# Altium footprint library Chris_R.PcbLib: 69 footprints (part 4 of 5)
Each footprint in its own frame and in the unit in brackets; x right, y up, seen from the top. Pads: shape width x height; smd on the part's side, far side on the other; paste and mask are expansions set on the pad; w line width, h text height; cw(c..) or ccw(c..) is an arc to the next point about the centre after c.
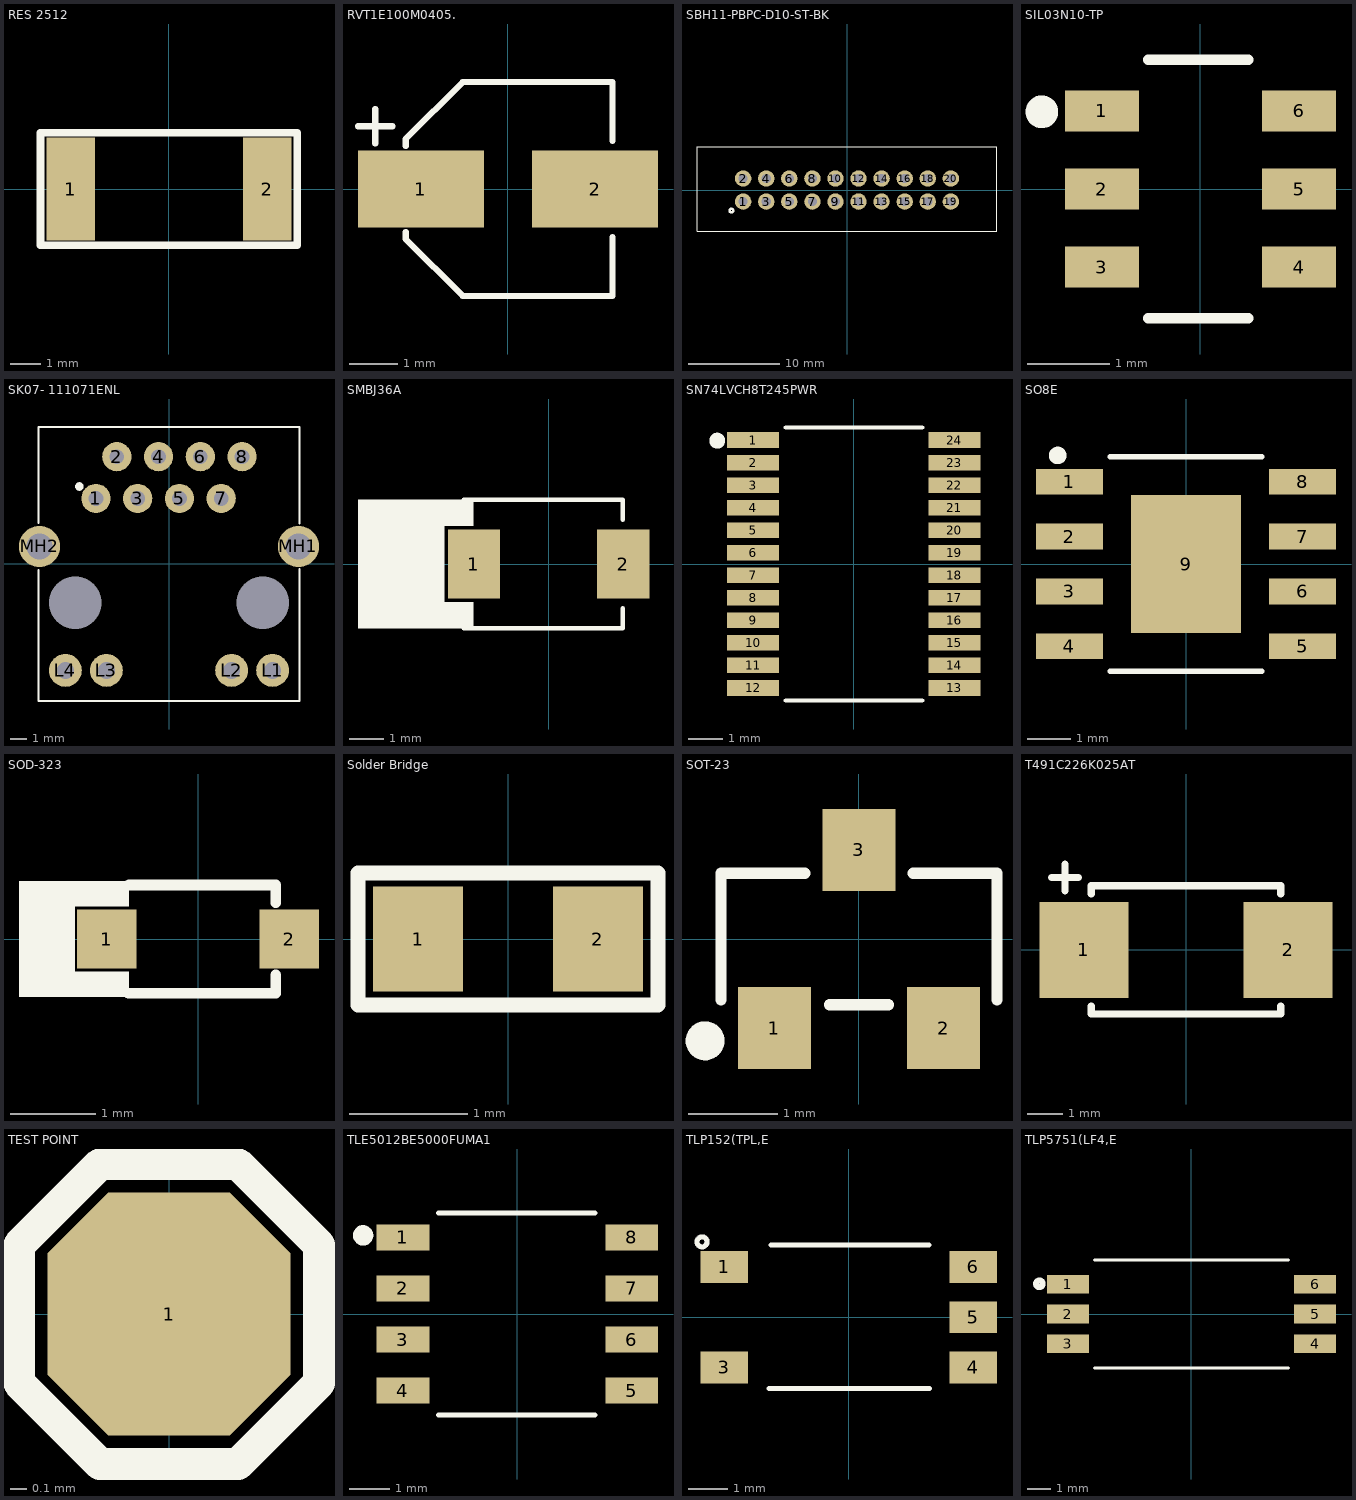
[diagram p3: the footprints below, top view; thin cyan lines are the x and y axes]

## RES 2512 [mm] "0.033O ±1% 2W ±1800ppm/°C 2512 Low Resistors & Current Sense Resistors - Surface Mount RoHS"
pads (2):
  rect 1.6x3.4 smd: 1(-3.25,0) 2(3.25,0)
Top Overlay:
  lines w0.254: -4.242,-1.854 -4.242,1.854 4.237,1.854 4.237,-1.854 -4.242,-1.854
3D body "CircuitWorks-RESISTOR 2512.step": height 0.58, standoff -0.03, extent -3.175,-1.63 3.175,1.63

## RVT1E100M0405. [mm] "10uF 25V 5.4mm SMD"
pads (2):
  rect 2.6x1.6 smd: 1(-1.8,0) 2(1.8,0)
Top Overlay:
  lines w0.127: -3.099,1.295 -2.388,1.295 ; -2.743,0.94 -2.743,1.651 ; -2.115,-0.889 -2.115,-1.035 -0.94,-2.21 2.159,-2.21 2.159,-0.991 ; -2.115,0.889 -2.115,1.035 -0.94,2.21 2.159,2.21 2.159,0.991
3D body "roqangrvt1e100m0405.stp": height 3.95, standoff -0.05, extent -2.65,-2.15 2.65,2.15

## SBH11-PBPC-D10-ST-BK [mm]
pads (20):
  round 1.8 hole 1: 1(-11.43,-1.27) 2(-11.43,1.27) 3(-8.89,-1.27) 4(-8.89,1.27) 5(-6.35,-1.27) 6(-6.35,1.27) 7(-3.81,-1.27) 8(-3.81,1.27) 9(-1.27,-1.27) 10(-1.27,1.27) 11(1.27,-1.27) 12(1.27,1.27) 13(3.81,-1.27) 14(3.81,1.27) 15(6.35,-1.27) 16(6.35,1.27) 17(8.89,-1.27) 18(8.89,1.27) 19(11.43,-1.27) 20(11.43,1.27)
Top Overlay:
  circle w0.254: c-12.725,-2.261 r0.203
  lines w0.127: -16.51,-4.521 16.51,-4.521 16.51,4.75 -16.51,4.75 -16.51,-4.521
3D body "SBH11-_ _ _C-D10-ST-_ _.STEP": height 9.5, standoff -2.6, extent -16.425,-4.426 16.475,4.674

## SIL03N10-TP [mm]
pads (6):
  rect 0.9x0.5 smd: 1(-1.2,0.95) 2(-1.2,0) 3(-1.2,-0.95) 4(1.2,-0.95) 5(1.2,0) 6(1.2,0.95)
Top Overlay:
  circle w0.254: c-1.93,0.94 r0.072
  lines w0.127: -0.635,-1.575 0.584,-1.575 ; -0.635,1.575 0.584,1.575
3D body "User Library-SOT-23-6L.step": height 1.38, standoff -0.02, extent -1.5,-1.524 1.5,1.524

## SK07- 111071ENL [mm] "CONN RJ45 WITH LED AND MAGNETICS"
pads (16):
  round 1.78 hole 0.9: 1(-4.445,3.96) 2(-3.175,6.5) 3(-1.905,3.96) 4(-0.635,6.5) 5(0.635,3.96) 6(1.905,6.5) 7(3.175,3.96) 8(4.445,6.5)
  round 2 hole 1.02: L1(6.3,-6.5) L2(3.81,-6.5) L3(-3.81,-6.5) L4(-6.3,-6.5)
  round 2.5 hole 1.6: MH1(7.875,1.04) MH2(-7.875,1.04)
  round 0 hole 3.2 unplated: MH3(-5.715,-2.39) MH4(5.715,-2.39)
Top Overlay:
  circle w0.254: c-5.448,4.686 r0.133
  lines w0.127: -7.95,-0.381 -7.95,-6.22 -7.95,-8.357 7.95,-8.357 7.95,-0.343 ; -7.95,2.476 -7.95,8.3 0,8.3 7.95,8.3 7.95,2.438
3D body "csak_0711_N.stp": height 16.7, standoff -3, extent -7.95,-8.3 7.95,8.3

## SMBJ36A [mm] "36V 40V Unidirectional 58.1V @ 10.3A 10.3A SMB"
pads (2):
  rect 1.5x2 smd: 1(-2.15,0) 2(2.15,0)
Top Overlay:
  rectangle: -5.486,-1.854 -2.997,1.854
  rectangle: -3.048,1.092 -2.159,1.854
  rectangle: -3.048,-1.854 -2.159,-1.092
  lines w0.127: -2.438,-1.854 2.134,-1.854 2.134,-1.27 ; -2.438,1.854 2.134,1.854 2.134,1.27
3D body "User Library-DO-214AA SMB.STEP": height 2.3, standoff 0, extent -2.7,-1.8 2.7,1.8

## SN74LVCH8T245PWR [mm]
pads (24):
  rect 1.5x0.45 smd: 1(-2.9,3.575) 2(-2.9,2.925) 3(-2.9,2.275) 4(-2.9,1.625) 5(-2.9,0.975) 6(-2.9,0.325) 7(-2.9,-0.325) 8(-2.9,-0.975) 9(-2.9,-1.625) 10(-2.9,-2.275) 11(-2.9,-2.925) 12(-2.9,-3.575) 13(2.9,-3.575) 14(2.9,-2.925) 15(2.9,-2.275) 16(2.9,-1.625) 17(2.9,-0.975) 18(2.9,-0.325) 19(2.9,0.325) 20(2.9,0.975) 21(2.9,1.625) 22(2.9,2.275) 23(2.9,2.925) 24(2.9,3.575)
Top Overlay:
  circle w0.254: c-3.937,3.556 r0.102
  lines w0.127: -1.956,-3.937 1.981,-3.937 ; -1.956,3.937 1.981,3.937
3D body "SN74LVCH8T245PWR.STEP": height 1.2, standoff 0, extent -3.2,-3.926 3.2,3.874

## SO8E [mm]
pads (9):
  rect 1.55x0.6 smd: 1(-2.7,1.905) 2(-2.7,0.635) 3(-2.7,-0.635) 4(-2.7,-1.905) 5(2.7,-1.905) 6(2.7,-0.635) 7(2.7,0.635) 8(2.7,1.905)
  rect 2.55x3.2 smd: 9(0,0)
Top Overlay:
  circle w0.254: c-2.972,2.515 r0.076
  lines w0.127: -1.753,-2.489 1.753,-2.489 ; -1.753,2.489 1.753,2.489
3D body "User Library-so8-4.step": height 1.72, standoff -0.05, extent -3.069,-2.445 3.068,2.445

## SOD-323 [mm] "36V 40V Unidirectional 75V 5A SOD-323 TVS ROHS"
pads (2):
  rect 0.7x0.7 smd: 1(-1.075,0) 2(1.075,0)
Top Overlay:
  rectangle: -1.524,0.381 -0.813,0.686
  rectangle: -1.524,-0.686 -0.813,-0.381
  rectangle: -2.108,-0.686 -1.448,0.686
  lines w0.127: -0.819,-0.638 0.914,-0.638 0.914,-0.425 ; -0.813,0.635 0.914,0.635 0.914,0.428
3D body "User Library-SOD-323.STEP": height 1.1, standoff 0, extent -1.3,-0.675 1.3,0.675

## Solder Bridge [mil] "Solder Bridge ON"
pads (2):
  rect 30x35 smd: 1(-30,0) 2(30,0)
Top Overlay:
  lines w5: -50,-22 50,-22 50,22 -50,22 -50,-22

## SOT-23 [mm] "TRANS NPN 40V 0.6A SOT23"
pads (3):
  rect 0.82x0.92 smd: 1(-0.95,-1) 2(0.95,-1) 3(0,1)
Top Overlay:
  circle w0.254: c-1.727,-1.143 r0.092
  lines w0.127: -1.549,-0.686 -1.549,0.737 -0.61,0.737 ; -0.33,-0.737 0.33,-0.737 ; 0.61,0.737 1.549,0.737 1.549,-0.686
3D body "CircuitWorks-SOT-23.step": height 1.1, standoff 0, extent -1.5,-1.25 1.5,1.25

## T491C226K025AT [mm]
pads (2):
  rect 2.5x2.7 smd: 1(-2.87,0) 2(2.87,0)
Top Overlay:
  lines w0.2: -3.785,2.032 -3.023,2.032 ; -3.404,1.651 -3.404,2.413 ; -2.667,-1.575 -2.667,-1.803 2.667,-1.803 2.667,-1.575 ; -2.667,1.575 -2.667,1.803 2.667,1.803 2.667,1.575
3D body "User Library-CAP_TANT_6032-28_y.step": height 2.8, standoff 0, extent -3.15,-1.75 3.15,1.75

## TEST POINT [mil]
pads (1):
  oct 60x60 smd: 1(0,0)
Top Overlay:
  lines w7.87: -17,-37 17,-37 ; -17,-37 -37,-17 -37,17 -17,37 ; -17,-37 17,-37 ; -17,37 17,37 ; -17,37 17,37 ; 17,-37 37,-17 37,17 17,37

## TLE5012BE5000FUMA1 [mm] "SENSOR ANGLE 360DEG SMD"
pads (8):
  rect 1.31x0.65 smd: 1(-2.845,1.905) 2(-2.845,0.635) 3(-2.845,-0.635) 4(-2.845,-1.905) 5(2.845,-1.905) 6(2.845,-0.635) 7(2.845,0.635) 8(2.845,1.905)
Top Overlay:
  circle w0.254: c-3.835,1.956 r0.127
  lines w0.127: -1.956,-2.515 1.93,-2.515 ; -1.956,2.515 1.93,2.515
3D body "User Library-SOIC-8-1.step": height 1.75, standoff 0, extent -3,-2.45 3,2.45

## TLP152(TPL,E [mm]
pads (5):
  rect 1.2x0.8 smd: 1(-3.15,1.27) 3(-3.15,-1.27) 4(3.15,-1.27) 5(3.15,0) 6(3.15,1.27)
Top Overlay:
  circle w0.127: c-3.708,1.905 r0.127
  lines w0.127: -2.011,-1.803 2.049,-1.803 ; -1.96,1.829 2.032,1.829
3D body "5pin SO6.step": height 2.2, standoff 0, extent -3.5,-1.85 3.5,1.85

## TLP5751(LF4,E [mm]
pads (6):
  rect 1.8x0.8 smd: 1(-5.3,1.27) 2(-5.3,0) 3(-5.3,-1.27) 4(5.3,-1.27) 5(5.3,0) 6(5.3,1.27)
Top Overlay:
  circle w0.254: c-6.528,1.295 r0.144
  lines w0.127: -4.166,-2.311 4.166,-2.311 ; -4.166,2.311 4.166,2.311
3D body "User Library-SO-6W.STEP": height 3.28, standoff 0, extent -5.75,-2.319 5.75,2.261